# Altium schematic symbol library bms_slave-mc33771c.SCHLIB: 83 symbols (part 1 of 2)
Pins are listed as number, name and electrical type; pins without a type are passive.

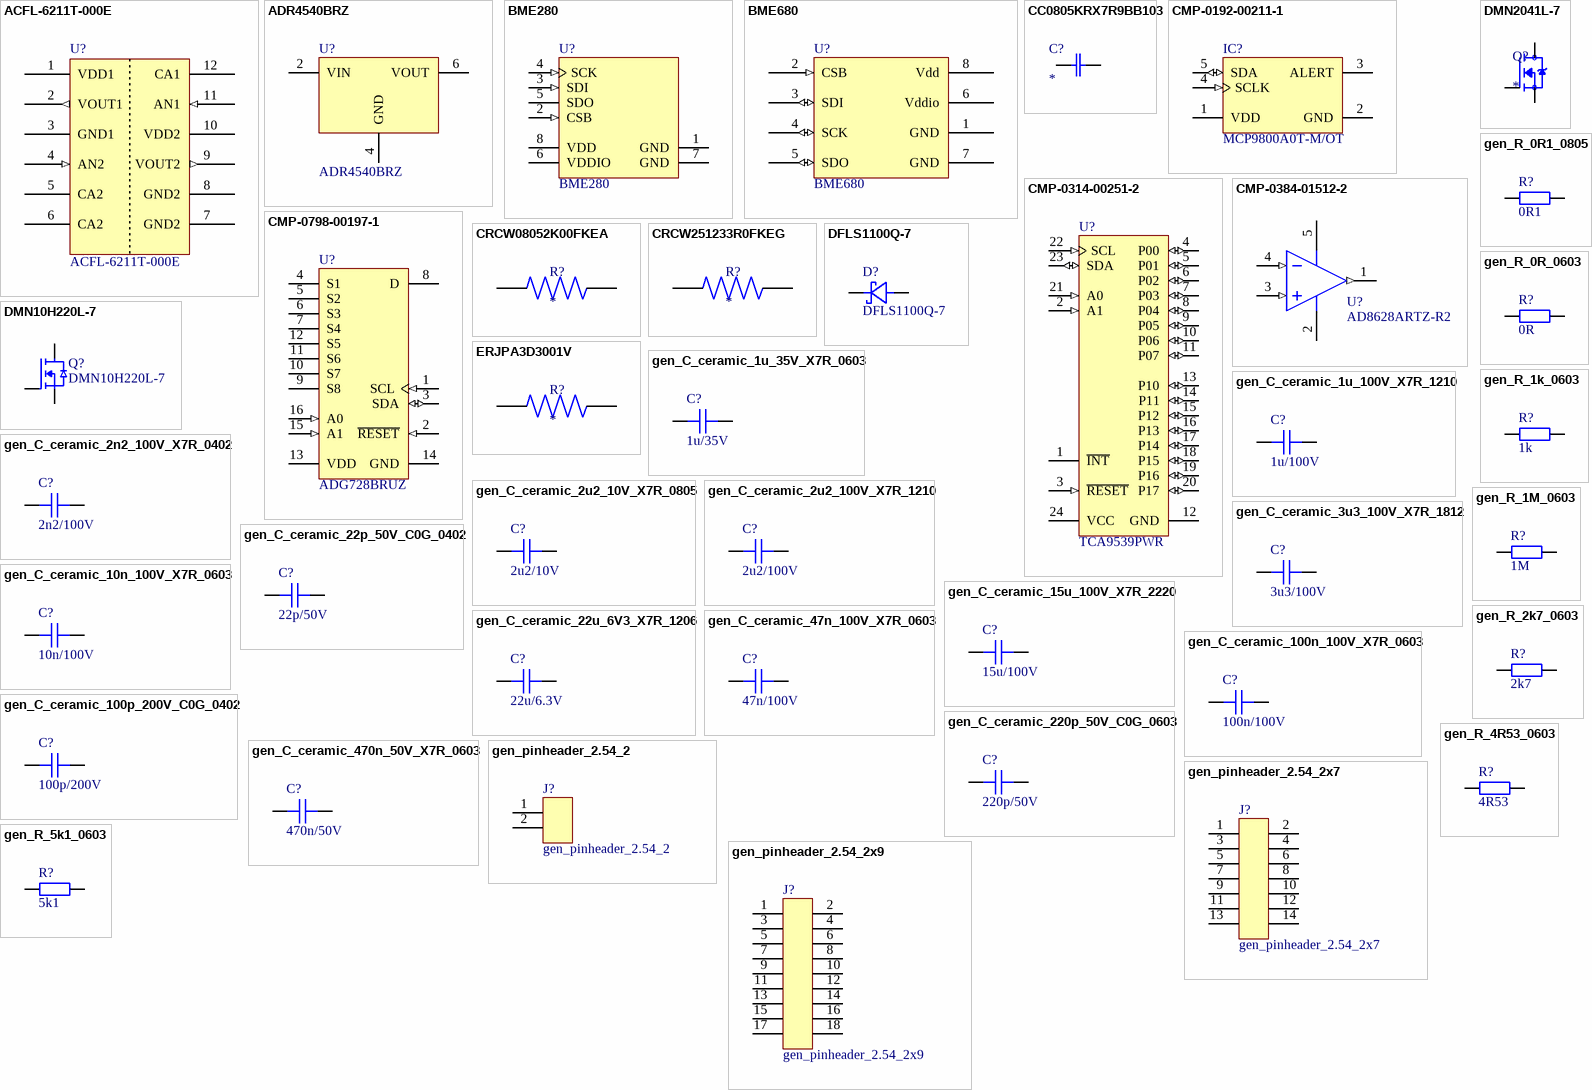
[diagram p0: symbols ACFL-6211T-000E to gen_R_5k1_0603]

## ACFL-6211T-000E
designator U?
15MBd Dual-channel Bi-directional Optocoupler; Manufacturer: Broadcom; PnP Package: 12-BSOP; Automotive Qualified: True; AEC-Q Norm: AEC-Q100; AEC-Q Grade: Grade 1; Part Number: ACFL-6211T-000E; Part Name: ACFL-6211T-000E; Operating Temperature: -40°C - +125°C; ComponentLink1Description: Datasheet; ComponentLink1URL: https://docs.broadcom.com/docs/AV02-4835EN; Supplier 1: Digikey; Supplier Part Number 1: 516-3808-ND; Supplier 2: Mouser; Supplier Part Number 2: 630-ACFL6211T000E; ECCN: EAR99
footprint Broadcom_ACFL-6211T
pins: 1 VDD1 (power), 2 VOUT1 (out), 3 GND1 (power), 4 AN2 (in), 5 CA2, 6 CA2, 7 GND2 (power), 8 GND2 (power), 9 VOUT2 (out), 10 VDD2 (power), 11 AN1 (in), 12 CA1

## ADR4540BRZ
designator U?
Ultralow Noise, High Accuracy 4.096V Reference; Manufacturer: Analog Devices; PnP Package: SO-8; Automotive Qualified: True; AEC-Q Norm: AEC-Q100; AEC-Q Grade: unknown; Part Number: ADR4540BRZ; Part Name: ADR4540BRZ; Operating Temperature: −40°C - +125°C; ComponentLink1Description: Datasheet; ComponentLink1URL: http://www.analog.com/media/en/technical-documentation/data-sheets/ADR4520_4525_4530_4533_4540_4550.pdf; Supplier 1: Farnell; Supplier Part Number 1: 2112692; Supplier 2: Mouser; Supplier Part Number 2: 584-ADR4540BRZ; Supplier 3: Digikey; Supplier Part Number 3: ADR4540BRZ-ND; ECCN: EAR99
footprint SOIC127P600X175-8N
pins: 2 VIN (power), 4 GND (power), 6 VOUT (power)

## BME280
designator U?
Low power pressure, temperature & humidity sensor; Manufacturer: Bosch Sensortec; PnP Package: LGA; Automotive Qualified: False; Datasheet Version: Rev. 1.2, 10/2015; Datasheet URL: http://datasheet.octopart.com/BME280-Bosch-datasheet-58577763.pdf; Manufacturer URL: http://www.bosch-sensortec.com; Part Number: BME280; Part Name: BME280; Operating Temperature: -40°C - +85°C; ComponentLink1Description: Datasheet; ComponentLink1URL: https://ae-bst.resource.bosch.com/media/_tech/media/datasheets/BST-BME280-DS002.pdf; Supplier 1: Digikey; Supplier Part Number 1: 828-1063-1-ND; Supplier 2: Mouser; Supplier Part Number 2: 262-BME280
footprint BOSC-BME280-8_V (SMD, 8-Leads, Body 2.5x2.5mm, Pitch 0.65mm)
pins: 1 GND (power) "Ground", 2 CSB (in) "Chip select", 3 SDI (in) "Serial data input", 4 SCK (in) "Serial clock input", 5 SDO "Serial data output", 6 VDDIO (power) "Digital/Interface supply", 7 GND (power) "Ground", 8 VDD (power) "Analog supply"

## BME680
designator U?
Low power gas, pressure, temperature & humidity sensor; Manufacturer: Bosch Sensortec; PnP Package: LGA; Automotive Qualified: False; Part Number: BME680; Part Name: BME680; Operating Temperature: -40°C - +85°C; ComponentLink1Description: Datasheet; ComponentLink1URL: https://ae-bst.resource.bosch.com/media/_tech/media/datasheets/BST-BME680-DS001.pdf; Supplier 1: Digikey; Supplier Part Number 1: 828-1077-1-ND; Supplier 2: Mouser; Supplier Part Number 2: 262-BME680
footprint BME680
pins: 1 GND (power) "Ground", 2 CSB (in) "Chip select", 3 SDI (io) "Serial data input", 4 SCK (io) "Serial clock input", 5 SDO (io) "Serial data output", 6 Vddio (power) "Digital / Interface supply", 7 GND (power) "Ground", 8 Vdd (power) "Analog supply"

## CC0805KRX7R9BB103
designator C?
10000 pF Â±10% 50V Ceramic Capacitor X7R 0805 (2012 Metric); MF: Yageo; MP: CC0805KRX7R9BB103; SnapEDA_Link: https://www.snapeda.com/parts/CC0805KRX7R9BB103/Yageo/view-part/?ref=snap; Package: 0805 Yageo; Value: *; Check_prices: https://www.snapeda.com/parts/CC0805KRX7R9BB103/Yageo/view-part/?ref=eda
footprint CAPC2013X110N
pins: 1 C1, 2 C2

## CMP-0192-00211-1
designator IC?, comment MCP9800A0T-M/OT
2-Wire High-Accuracy Temperature Sensor, Slave Address 000, 5-Pin SOT-23, -55°C to +125°C Temperature, Tape and Reel; PackageReference: SOT-23-OT5; PackageVersion: revBB, Aug-2009; DatasheetVersion: revD, Nov-2010; PackageDescription: 5-Lead Plastic Small Outline Transistor (OT) [SOT-23]; Code_IPC: SOT23-5
footprint SOT-23-OT5_L (SOT23, 5-Leads, Body 2.9x1.6mm, Pitch 0.95mm, Lead Span 2.7mm, IPC High Density)
footprint SOT-23-OT5_M (SOT23, 5-Leads, Body 2.9x1.6mm, Pitch 0.95mm, Lead Span 2.7mm, IPC Low Density)
footprint SOT-23-OT5_N (SOT23, 5-Leads, Body 2.9x1.6mm, Pitch 0.95mm, Lead Span 2.7mm, IPC Medium Density)
pins: 1 VDD (power), 2 GND (power), 3 ALERT (oc), 4 SCLK (in), 5 SDA (io)

## CMP-0314-00251-2
designator U?, comment TCA9539PWR
Remote 16-Bit I2C and SMBus, Low-Power I/O Expander with Interrupt Output, Reset & Config. Register, 1.65 to 5.5 V, -40 to 85 degC, 24-pin TSSOP (PW), Green (RoHS & no Sb/Br); Manufacturer: Texas Instruments; Interrupt Output: Yes; SubFamily: I2C IO Expander; I2C Address: 1110 1xx; # of I/Os: 16; Max Frequency(kHz): 400; 5V Tolerant I/O: Yes; ComponentLink1Description: Datasheet; PartNumber: TCA9539PWR; Eco-Plan: Green (RoHS & no Sb/Br); Reset Input: Yes; ComponentLink2Description: Package Specification; Mounting Technology: Surface Mount; PackageReference: PW0024A; DatasheetVersion: SCPS202A; ComponentLink1URL: http://www.ti.com/general/docs/lit/getliterature.tsp?genericPartNumber=TCA9539&fileType=pdf; Vcc range(V): 1.65 to 5.5; Low Power: Yes; Code_JEDEC: MO-153; Configuration Registers: Yes; PackageVersion: revG, Feb-2011; PackageDescription: 24-Pin Thin Small Outline Package 0.65 mm Pitch; Push-Pull I/O Type: Yes; ComponentLink2URL: http://www.ti.com/litv/pdf/mpds177g
footprint PW0024A_M (SOP, 24-Leads, Body 7.9x4.5mm, Pitch 0.65mm, IPC Low Density)
footprint PW0024A_L (SOP, 24-Leads, Body 7.9x4.5mm, Pitch 0.65mm, IPC High Density)
footprint PW0024A_N (SOP, 24-Leads, Body 7.9x4.5mm, Pitch 0.65mm, IPC Medium Density)
pins: 1 ~{INT} (oc) "Interrupt output. Connect to VCC through a pullup resistor.", 2 A1 (in) "Address input. Connect directly to VCC or ground.", 3 ~{RESET} (in) "Active-low reset input. Connect to VCC  through a pullup resistor, if no active connection is used.", 4 P00 (io) "P-port input/output. Push-pull design structure. At power-on, P00 is configured as an input.", 5 P01 (io) "P-port input/output. Push-pull design structure. At power-on, P01 is configured as an input.", 6 P02 (io) "P-port input/output. Push-pull design structure. At power-on, P02 is configured as an input.", 7 P03 (io) "P-port input/output. Push-pull design structure. At power-on, P03 is configured as an input.", 8 P04 (io) "P-port input/output. Push-pull design structure. At power-on, P04 is configured as an input.", 9 P05 (io) "P-port input/output. Push-pull design structure. At power-on, P05is configured as an input.", 10 P06 (io) "P-port input/output. Push-pull design structure. At power-on, P06 is configured as an input.", 11 P07 (io) "P-port input/output. Push-pull design structure. At power-on, P07 is configured as an input.", 12 GND (power) "Ground", 13 P10 (io) "P-port input/output. Push-pull design structure. At power-on, P10 is configured as an input.", 14 P11 (io) "P-port input/output. Push-pull design structure. At power-on, P11 is configured as an input.", 15 P12 (io) "P-port input/output. Push-pull design structure. At power-on, P12 is configured as an input.", 16 P13 (io) "P-port input/output. Push-pull design structure. At power-on, P13 is configured as an input.", 17 P14 (io) "P-port input/output. Push-pull design structure. At power-on, P14 is configured as an input.", 18 P15 (io) "P-port input/output. Push-pull design structure. At power-on, P15 is configured as an input.", 19 P16 (io) "P-port input/output. Push-pull design structure. At power-on, P16 is configured as an input.", 20 P17 (io) "P-port input/output. Push-pull design structure. At power-on, P17 is configured as an input.", 21 A0 (in) "Address input. Connect directly to VCC or ground.", 22 SCL (in) "Serial clock bus. Connect to VCC through a pullup resistor.", 23 SDA (io) "Serial data bus. Connect to VCC through a pullup resistor.", 24 VCC (power) "Supply voltage"

## CMP-0384-01512-2
designator U?, comment AD8628ARTZ-R2
Single Channel RRIO Operational Amplifier, 2.5 MHz BW, 1 V/us SR, Industrial, 5-pin SOT23 (RJ-5), Reel; Manufacturer: Analog Devices; Generic Part Number: AD8628; Iq/Amp: 1.1mA; Automotive Qualified: Yes; V Span Max: 6V; Input Bias Current: 30pA; Slew Rate: 1V/us; Amplifiers Per Package: 1; Input Offset Voltage: 1uV; Small Signal Bandwidth: 2.5MHz; V Span Min: 2.7V; ComponentLink1Description: Manufacturer URL; DatasheetVersion: Rev. I; ComponentLink4Description: Reference Circuit; Code_JEDEC: MO-178-AA; PackageDescription: 5-Pin Small Outline Transistor Package, Body 2.9 x 1.6 mm, Pitch 0.95 mm; ComponentLink3URL: http://www.analog.com/static/imported-files/packages/PKG_PDF/SOT-23(RJ)/RJ_5.pdf; PackageReference: RJ-5; ComponentLink1URL: http://www.analog.com/en/index.html; PackageVersion: 121608-A; RevisionNote: Reference Circuit URL fixed; Mounting Technology: Surface Mount; ComponentLink2Description: Datasheet; ComponentLink3Description: Package Specification; ComponentLink4URL: http://www.analog.com/en/all-operational-amplifiers-op-amps/operational-amplifiers-op-amps/ad8628/products/product.html#product-recommendations; ComponentLink2URL: http://www.analog.com/static/imported-files/data_sheets/AD8628_8629_8630.pdf; PartNumber: AD8628ARTZ-R2
footprint ADI-RJ-5_M (SOT-23, 5-Leads, Body 2.9x1.6mm, Pitch 0.95mm, IPC Low Density)
footprint ADI-RJ-5_N (SOT-23, 5-Leads, Body 2.9x1.6mm, Pitch 0.95mm, IPC Medium Density)
footprint ADI-RJ-5_L (SOT-23, 5-Leads, Body 2.9x1.6mm, Pitch 0.95mm, IPC High Density)
pins: 1 OUT (out), 2 -V (power), 3 +IN (in), 4 -IN (in), 5 +V (power)

## CMP-0798-00197-1
designator U?, comment ADG728BRUZ
CMOS, Low Voltage, 2-Wire Serially Controlled, Matrix Switch, -40 to 85 degC, 16-pin SOP (RU-16), Tube; Manufacturer: Analog Devices; Ron (ohms): 2.5; Supply V Guar Performance: Single_(+3V), Single_(+5V); Max Analog Signal Range: 0 to Vdd; Bandwidth (Hz): 65M; ComponentLink3Description: Package Specification; Packing: Tube; PartNumber: ADG728BRUZ; ComponentLink1URL: http://www.analog.com/en/index.html; Mounting Technology: Surface Mount; DatasheetVersion: Rev. C; ComponentLink1Description: Manufacturer URL; ComponentLink3URL: http:/www.analog.com/static/imported-files/packages/36244347913743854010197452789RU16.pdf; ComponentLink2URL: http://www.analog.com/static/imported-files/data_sheets/ADG728_729.pdf; PackageVersion: Nov-02; PackageDescription: 16-Pin Thin Shrink Small Outline Package, Body 5 x 4.4 mm, Pitch 0.65 mm; Code_JEDEC: MO-153AB; PackageReference: RU-16; ComponentLink2Description: Datasheet
footprint ADI-RU-16_M (SOP, 16-Leads, Body 5x4.4mm, Pitch 0.65mm, IPC Low Density)
footprint ADI-RU-16_L (SOP, 16-Leads, Body 5x4.4mm, Pitch 0.65mm, IPC High Density)
footprint ADI-RU-16_N (SOP, 16-Leads, Body 5x4.4mm, Pitch 0.65mm, IPC Medium Density)
pins: 1 SCL (in) "Serial Clock Line. This is used in conjunction with the SDA line to clock data into the 8-bit input shift register. Clock rates of up to 400 kbit/s can be accommodated with this 2-wire serial interface.", 2 ~{RESET} (in) "Active low control input that clears the input register and turns all switches to the OFF condition.", 3 SDA (io) "Serial Data Line. This is used in conjunction with the SCL line to clock data into the 8-bit input shift register during the write cycle and used to read back 1 byte of data during the read cycle. It is a bidirectional (See Datasheet)", 4 S1 "Source. May be an input or output.", 5 S2 "Source. May be an input or output.", 6 S3 "Source. May be an input or output.", 7 S4 "Source. May be an input or output.", 8 D "Drain. May be an input or output.", 9 S8 "Source. May be an input or output.", 10 S7 "Source. May be an input or output.", 11 S6 "Source. May be an input or output.", 12 S5 "Source. May be an input or output.", 13 VDD (power) "Power Supply Input. These parts can be operated from a supply of 2.7 V to 5.5 V.", 14 GND (power) "Ground Reference.", 15 A1 (in) "Address Input. Sets the second least significant bit of the 7-bit slave address.", 16 A0 (in) "Address Input. Sets the least significant bit of the 7-bit slave address."

## CRCW08052K00FKEA
designator R?
Resistor,Thick Film,Res 2 Kilohms,Pwr-Rtg 0.125 W,Tol 1%,SMT,0805,Tape & Reel | Vishay Dale CRCW08052K00FKEA; SnapEDA_Link: https://www.snapeda.com/parts/CRCW08052K00FKEA/Vishay+Dale/view-part/?ref=snap; Package: 2012 Vishay; Value: *; MF: Vishay Dale; MP: CRCW08052K00FKEA; Check_prices: https://www.snapeda.com/parts/CRCW08052K00FKEA/Vishay+Dale/view-part/?ref=eda
footprint RESC2012X50N
pins: 1, 2

## CRCW251233R0FKEG
designator R?
33 Ohms Â±1% 1.5W Chip Resistor 2512 (6432 Metric) Automotive AEC-Q200, Pulse Withstanding Thick Film; MF: Vishay; MP: CRCW251233R0FKEG; SnapEDA_Link: https://www.snapeda.com/parts/CRCW251233R0FKEG/Vishay/view-part/?ref=snap; Package: 6331 Vishay; Value: *; Check_prices: https://www.snapeda.com/parts/CRCW251233R0FKEG/Vishay/view-part/?ref=eda
footprint RESC6331X70N
pins: 1, 2

## DFLS1100Q-7
designator D?
Schottky Diode; Manufacturer: Diodes Inc.; Breakdown Voltage: 100V; Continuous Forward Current: 1A; PnP Package: POWERDI123; Automotive Qualified: True; Part Number: DFLS1100Q-7; Part Name: DFLS1100Q-7; Operating Temperature: −55°C - +175°C; ComponentLink1Description: Datasheet; ComponentLink1URL: https://www.diodes.com/assets/Datasheets/ds30497.pdf; Supplier 1: Mouser; Supplier Part Number 1: 621-DFLS1-100Q-7; Supplier 2: Digikey; Supplier Part Number 2: DFLS1100Q-7DICT-ND; Supplier 3: Farnell; Supplier Part Number 3: 3127293
footprint PowerDI123
pins: 1 K, 2 A

## DMN10H220L-7
designator Q?
MOSFET-Transistor, n-Kanal, 1.6 A, 100 V, 0.250 ohm; Part Name: NMOS; Manufacturer: Diodes; Maximum Drain-Source Voltage: 100V; Maximum Continous Drain Current (25°C): 1.6A; R_DS(on): 250m; Total Gate Charge: 4.1nC; Automotive Qualified: True; Part Number: DMN10H220L-7; Operating Temperature: -55°C - +150°C; ComponentLink1Description: Datasheet; ComponentLink1URL: https://www.diodes.com/assets/Datasheets/DMN10H220L.pdf; Supplier 1: Digikey; Supplier Part Number 1: DMN10H220L-7DICT-ND
footprint SOT95P237X110-3N
pins: D, G, S

## DMN2041L-7
designator Q?
MOSFET N-Channel 20V 6.4A SOT23 | Diodes Inc DMN2041L-7; MF: Diodes Inc.; SnapEDA_Link: https://www.snapeda.com/parts/DMN2041L-7/Diodes+Inc./view-part/?ref=snap; Package: SOT-23 Diodes Inc.; Value: *; MP: DMN2041L-7; Check_prices: https://www.snapeda.com/parts/DMN2041L-7/Diodes+Inc./view-part/?ref=eda
footprint SOT91P240X110-3N
pins: 1 G, 2 S, 3 D

## ERJPA3D3001V
designator R?
RES SMD 3K OHM 0.5% 1/4W 0603; MF: Panasonic; MP: ERJPA3D3001V; SnapEDA_Link: https://www.snapeda.com/parts/ERJPA3D3001V/Panasonic/view-part/?ref=snap; Package: 1608-2 Panasonic; Value: *; Check_prices: https://www.snapeda.com/parts/ERJPA3D3001V/Panasonic/view-part/?ref=eda
footprint RES_ERJPA3D3001V
pins: 1, 2

## gen_C_ceramic_1u_35V_X7R_0603
designator C?, comment 1u/35V
MLCC; Part Number: gen_C_ceramic_1u_35V_X7R_0603; Capacitance: 1u; Rated Voltage: 35V; Dielectric: X7R; Case EIA: 0603; Case Metric: 1608; Automotive Qualified: True; PnP Package: 0603C; PnP Value: 1uF/35V/X7R; PnP equipped: x; AEC-Q Norm: AEC-Q200; Supplier 1: Farnell; Supplier Part Number 1: 2906941; Operating Temperature: -55°C - +125°C; ECCN: EAR99
footprint CAPC1608X08N
footprint CAPC1608X08L
footprint CAPC1608X08M
pins: 1, 2

## gen_C_ceramic_1u_100V_X7R_1210
designator C?, comment 1u/100V
MLCC; Part Number: gen_C_ceramic_1u_100V_X7R_1210; Capacitance: 1u; Rated Voltage: 100V; Dielectric: X7R; Case EIA: 1210; Case Metric: 3225; AVT Set: x; Automotive Qualified: True; Supplier 1: Farnell; Supplier Part Number 1: 1301722
footprint CAPC3225X25N
footprint CAPC3225X25L
footprint CAPC3225X25M
pins: 1, 2

## gen_C_ceramic_2n2_100V_X7R_0402
designator C?, comment 2n2/100V
MLCC; Part Number: gen_C_ceramic_2n2_100V_X7R_0402; Capacitance: 2n2; Rated Voltage: 100V; Dielectric: X7R; Case EIA: 0402; Case Metric: 1005; Automotive Qualified: True; PnP Package: 0402C; Supplier 1: Digikey; Supplier Part Number 1: 490-4911-1-ND
footprint CAPC1005X06N
footprint CAPC1005X06L
footprint CAPC1005X06M
pins: 1, 2

## gen_C_ceramic_2u2_10V_X7R_0805
designator C?, comment 2u2/10V
MLCC; Part Number: gen_C_ceramic_2u2_10V_X7R_0805; Capacitance: 2u2; Rated Voltage: 10V; Dielectric: X7R; Case EIA: 0805; Case Metric: 2012; Automotive Qualified: True; Supplier 1: Farnell; Supplier Part Number 1: 2478259; Supplier 2: Farnell; Supplier Part Number 2: 2070513
footprint CAPC2012X14N
footprint CAPC2012X14L
footprint CAPC2012X14M
pins: 1, 2

## gen_C_ceramic_2u2_100V_X7R_1210
designator C?, comment 2u2/100V
MLCC; Part Number: gen_C_ceramic_2u2_100V_X7R_1210; Capacitance: 2u2; Rated Voltage: 100V; Dielectric: X7R; Case EIA: 1210; Case Metric: 3225; AVT Set: x; Automotive Qualified: True; Supplier 1: Farnell; Supplier Part Number 1: 2781417; Supplier 2: Farnell; Supplier Part Number 2: 2579027
footprint CAPC3225X25N
footprint CAPC3225X25L
footprint CAPC3225X25M
pins: 1, 2

## gen_C_ceramic_3u3_100V_X7R_1812
designator C?, comment 3u3/100V
MLCC; Part Number: gen_C_ceramic_3u3_100V_X7R_1812; Capacitance: 3u3; Rated Voltage: 100V; Dielectric: X7R; Case EIA: 1812; Case Metric: 4532; Automotive Qualified: True; Supplier 1: Farnell; Supplier Part Number 1: 2579025; Supplier 2: Digikey; Supplier Part Number 2: 399-13376-1-ND; Supplier 3: Mouser; Supplier Part Number 3: 80-C1812C335K1RAUTO
footprint CAPC4532X16N
footprint CAPC4532X16L
footprint CAPC4532X16M
pins: 1, 2

## gen_C_ceramic_10n_100V_X7R_0603
designator C?, comment 10n/100V
MLCC; Part Number: gen_C_ceramic_10n_100V_X7R_0603; Capacitance: 10n; Rated Voltage: 100V; Dielectric: X7R; Case EIA: 0603; Case Metric: 1608; PnP Package: 0603C; PnP Value: 10nF/100V/X7R; Automotive Qualified: True; AEC-Q Norm: AEC-Q200; Supplier 1: Farnell; Supplier Part Number 1: 1301715; Supplier 2: Farnell; Supplier Part Number 2: 2821192; Supplier 3: Farnell; Supplier Part Number 3: 2210878; ECCN: EAR99
footprint CAPC1608X08N
footprint CAPC1608X08L
footprint CAPC1608X08M
pins: 1, 2

## gen_C_ceramic_15u_100V_X7R_2220
designator C?, comment 15u/100V
Stacked MLCC; Part Number: gen_C_ceramic_15u_100V_X7R_2220; Capacitance: 15u; Rated Voltage: 100V; Dielectric: X7R; Case EIA: 2220; Case Metric: 5750; Automotive Qualified: True; Supplier 1: Farnell; Supplier Part Number 1: 2781468; Supplier 2: Digikey; Supplier Part Number 2: 490-5838-1-ND; Supplier 3: Mouser; Supplier Part Number 3: 81-KCM55WR72A156MH1K
footprint CAPC6153X67N
footprint CAPC6153X67L
footprint CAPC6153X67M
pins: 1, 2

## gen_C_ceramic_22p_50V_C0G_0402
designator C?, comment 22p/50V
MLCC; Part Number: gen_C_ceramic_22p_50V_C0G_0402; Capacitance: 22p; Rated Voltage: 50V; Dielectric: C0G; Case EIA: 0402; Case Metric: 1005; PnP Package: 0402C; Automotive Qualified: True; Tolerance: 1%; Supplier 1: Farnell; Supplier Part Number 1: 1856067
footprint CAPC1005X06N
footprint CAPC1005X06L
footprint CAPC1005X06M
pins: 1, 2

## gen_C_ceramic_22u_6V3_X7R_1206
designator C?, comment 22u/6.3V
MLCC; Part Number: gen_C_ceramic_22u_6V3_X7R_1206; Capacitance: 22u; Rated Voltage: 6.3V; Dielectric: X7R; Case EIA: 1206; Case Metric: 3216; Automotive Qualified: True; Supplier 1: Farnell; Supplier Part Number 1: 2672216; Supplier 2: Farnell; Supplier Part Number 2: 2211066
footprint CAPC3216X18N
footprint CAPC3216X18L
footprint CAPC3216X18M
pins: 1, 2

## gen_C_ceramic_47n_100V_X7R_0603
designator C?, comment 47n/100V
MLCC; Part Number: gen_C_ceramic_47n_100V_X7R_0603; Capacitance: 47n; Rated Voltage: 100V; Dielectric: X7R; Case EIA: 0603; Case Metric: 1608; Automotive Qualified: True; PnP Package: 0603C; Supplier 1: Farnell; Supplier Part Number 1: 2478249; Supplier 2: Farnell; Supplier Part Number 2: 2708699; Supplier 3: Farnell; Supplier Part Number 3: 2905110
footprint CAPC1608X08N
footprint CAPC1608X08L
footprint CAPC1608X08M
pins: 1, 2

## gen_C_ceramic_100n_100V_X7R_0603
designator C?, comment 100n/100V
MLCC; Part Number: gen_C_ceramic_100n_100V_X7R_0603; Capacitance: 100n; Rated Voltage: 100V; Dielectric: X7R; Case EIA: 0603; Case Metric: 1608; Automotive Qualified: True; PnP Package: 0603C; Supplier 1: Digikey; Supplier Part Number 1: 490-13420-1-ND; Supplier 2: Mouser; Supplier Part Number 2: 81-GCJ188R72A104KA1D
footprint CAPC1608X08N
footprint CAPC1608X08L
footprint CAPC1608X08M
pins: 1, 2

## gen_C_ceramic_100p_200V_C0G_0402
designator C?, comment 100p/200V
MLCC; Part Number: gen_C_ceramic_100p_200V_C0G_0402; Capacitance: 100p; Rated Voltage: 200V; Dielectric: C0G; Tolerance: 5%; Case EIA: 0402; Case Metric: 1005; PnP Package: 0402C; Automotive Qualified: True; Supplier 1: Farnell; Supplier Part Number 1: 2426878; Supplier 2: Digikey; Supplier Part Number 2: 399-11551-1-ND; Supplier 3: RS Components; Supplier Part Number 3: 8353949
footprint CAPC1005X06N
footprint CAPC1005X06L
footprint CAPC1005X06M
pins: 1, 2

## gen_C_ceramic_220p_50V_C0G_0603
designator C?, comment 220p/50V
MLCC; Part Number: gen_C_ceramic_220p_50V_C0G_0603; Capacitance: 220p; Rated Voltage: 50V; Dielectric: C0G; Case EIA: 0603; Case Metric: 1608; Automotive Qualified: True; AEC-Q Norm: AEC-Q200; PnP Package: 0603C; Supplier 1: Mouser; Supplier Part Number 1: 603-AC603JRNPO9BN221; ECCN: EAR99
footprint CAPC1608X08N
footprint CAPC1608X08L
footprint CAPC1608X08M
pins: 1, 2

## gen_C_ceramic_470n_50V_X7R_0603
designator C?, comment 470n/50V
MLCC; Part Number: gen_C_ceramic_470n_50V_X7R_0603; Capacitance: 470n; Rated Voltage: 50V; Dielectric: X7R; Case EIA: 0603; Case Metric: 1608; Automotive Qualified: True; AEC-Q Norm: AEC-Q200; PnP Package: 0603C; Supplier 1: Farnell; Supplier Part Number 1: 2547051; ECCN: EAR99
footprint CAPC1608X08N
footprint CAPC1608X08L
footprint CAPC1608X08M
pins: 1, 2

## gen_pinheader_2.54_2
designator J?
Standard Pinheader, THD, gerade, 2.54mm; Circuits: 2; Rated Voltage: 250V; Rated Current: 3A; Automotive Qualified: False; Part Number: gen_pinheader_2.54_2; Part Name: PinHeader; Operating Temperature: −40 °C - +105 °C; Supplier 1: Farnell; Supplier Part Number 1: 2505044
footprint Pinheader_2.54_2
pins: 1, 2

## gen_pinheader_2.54_2x7
designator J?
Standard Pinheader, THD, gerade, 2.54mm, 2-reihig; Circuits: 14; Rated Voltage: 250V; Rated Current: 3A; Automotive Qualified: False; Part Number: gen_pinheader_2.54_2x7; Part Name: PinHeader; Operating Temperature: −40 °C - +105 °C; Supplier 1: Mouser; Supplier Part Number 1: 200-TSW10707GD
footprint Pinheader_2.54_2x7
pins: 1, 2, 3, 4, 5, 6, 7, 8, 9, 10, 11, 12, 13, 14

## gen_pinheader_2.54_2x9
designator J?
Standard Pinheader, THD, gerade, 2.54mm, 2-reihig; Circuits: 18; Rated Voltage: 250V; Rated Current: 3A; Automotive Qualified: False; Part Number: gen_pinheader_2.54_2x9; Part Name: PinHeader; Operating Temperature: −40 °C - +105 °C; Supplier 1: Farnell; Supplier Part Number 1: 2025256
footprint Pinheader_2.54_2x9
pins: 1, 2, 3, 4, 5, 6, 7, 8, 9, 10, 11, 12, 13, 14, 15, 16, 17, 18

## gen_R_0R1_0805
designator R?, comment 0R1
SMD Resistor 0R1 0805; Part Number: gen_R_0R1_0805; Power: 250mW; Case EIA: 0805; Maximum Working Voltage: 150V; Automotive Qualified: True; Operating Temperature: -55°C - +155°C; Resistance: 0R1; Supplier 1: Farnell; Supplier Part Number 1: 2824733; Supplier 2: Digikey; Supplier Part Number 2: CRM0805AJX-R100ELFCT-ND
footprint RESC2012X05N
footprint RESC2012X05L
footprint RESC2012X05M
pins: 1, 2
1 alternate drawing of the same symbol

## gen_R_0R_0603
designator R?, comment 0R
SMD Resistor 0R 0603; Part Number: gen_R_0R_0603; Power: 0.1W; Case EIA: 0603; Case Metric: 1608; Maximum Working Voltage: 75V; PnP Package: 0603R; Automotive Qualified: True; PnP equipped: x; Operating Temperature: -55°C - +155°C; Resistance: 0R; Series: Jumper; PnP Value: 0R; Supplier 1: Farnell; Supplier Part Number 1: 2616580
footprint RESC1608X05N
footprint RESC1608X05L
footprint RESC1608X05M
pins: 1, 2
1 alternate drawing of the same symbol

## gen_R_1k_0603
designator R?, comment 1k
SMD Resistor 1k 0603; Part Number: gen_R_1k_0603; Tolerance: 1%; Power: 0.1W; Case EIA: 0603; Case Metric: 1608; Maximum Working Voltage: 75V; PnP Package: 0603R; Automotive Qualified: True; PnP equipped: x; Operating Temperature: -55°C - +155°C; Resistance: 1k; Series: E24, E96; PnP Value: 1k; Supplier 1: Farnell; Supplier Part Number 1: 1652848
footprint RESC1608X05N
footprint RESC1608X05L
footprint RESC1608X05M
pins: 1, 2
1 alternate drawing of the same symbol

## gen_R_1M_0603
designator R?, comment 1M
SMD Resistor 1M 0603; Part Number: gen_R_1M_0603; Tolerance: 1%; Power: 0.1W; Case EIA: 0603; Case Metric: 1608; Maximum Working Voltage: 75V; PnP Package: 0603R; Automotive Qualified: True; Operating Temperature: -55°C - +155°C; Resistance: 1M; Series: E24, E96; PnP Value: 1M; Supplier 1: Farnell; Supplier Part Number 1: 1469746
footprint RESC1608X05N
footprint RESC1608X05L
footprint RESC1608X05M
pins: 1, 2
1 alternate drawing of the same symbol

## gen_R_2k7_0603
designator R?, comment 2k7
SMD Resistor 2k7 0603; Part Number: gen_R_2k7_0603; Tolerance: 1%; Power: 0.1W; Case EIA: 0603; Case Metric: 1608; Maximum Working Voltage: 75V; PnP Package: 0603R; Automotive Qualified: False; Operating Temperature: -55°C - +155°C; Resistance: 2k7; Series: E24; PnP Value: 2k7
footprint RESC1608X05N
footprint RESC1608X05L
footprint RESC1608X05M
pins: 1, 2
1 alternate drawing of the same symbol

## gen_R_4R53_0603
designator R?, comment 4R53
SMD Resistor 4R53 0603; Part Number: gen_R_4R53_0603; Tolerance: 1%; Power: 0.1W; Case EIA: 0603; Case Metric: 1608; Maximum Working Voltage: 75V; PnP Package: 0603R; Automotive Qualified: False; Operating Temperature: -55°C - +155°C; Resistance: 4R53; Series: E96; PnP Value: 4R53
footprint RESC1608X05N
footprint RESC1608X05L
footprint RESC1608X05M
pins: 1, 2
1 alternate drawing of the same symbol

## gen_R_5k1_0603
designator R?, comment 5k1
SMD Resistor 5k1 0603; Part Number: gen_R_5k1_0603; Tolerance: 5%; Power: 0.1W; Case EIA: 0603; Case Metric: 1608; Maximum Working Voltage: 75V; PnP Package: 0603R; Automotive Qualified: True; AEC-Q Norm: AEC-Q200; Operating Temperature: -55°C - +155°C; Resistance: 5k1; Series: E24; PnP Value: 5k1; Supplier 1: Mouser; Supplier Part Number 1: 667-ERJ-3GEYJ512V; ECCN: EAR99
footprint RESC1608X05N
footprint RESC1608X05L
footprint RESC1608X05M
pins: 1, 2
1 alternate drawing of the same symbol

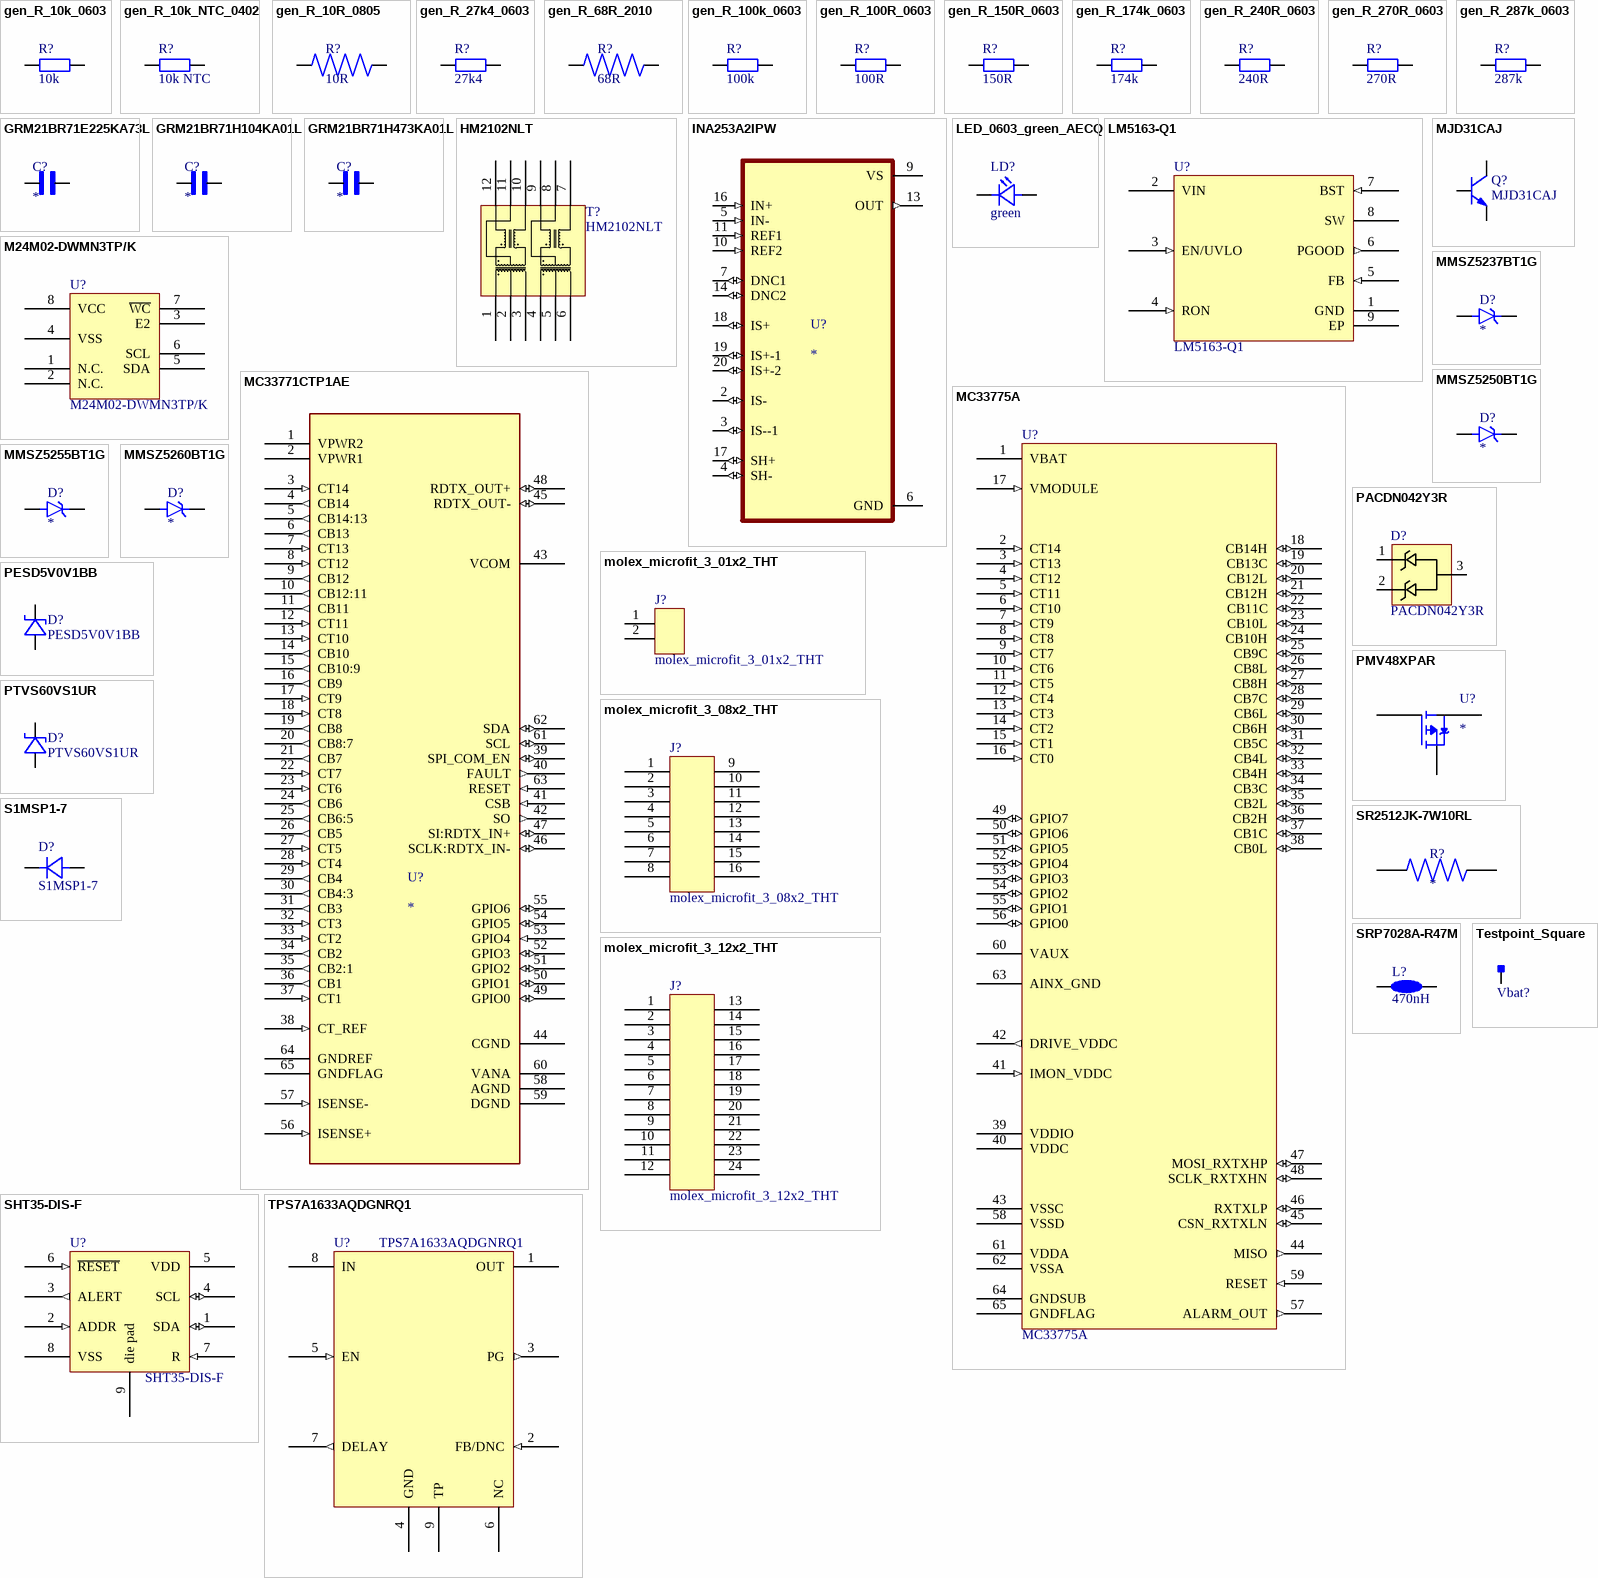
[diagram p1: symbols gen_R_10k_0603 to TPS7A1633AQDGNRQ1]

## gen_R_10k_0603
designator R?, comment 10k
SMD Resistor 10k 0603; Part Number: gen_R_10k_0603; Tolerance: 1%; Power: 0.1W; Case EIA: 0603; Case Metric: 1608; Maximum Working Voltage: 75V; PnP Package: 0603R; Automotive Qualified: True; Operating Temperature: -55°C - +155°C; Resistance: 10k; Series: E24, E96; PnP Value: 10k; Supplier 1: Farnell; Supplier Part Number 1: 2073349
footprint RESC1608X05N
footprint RESC1608X05L
footprint RESC1608X05M
pins: 1, 2
1 alternate drawing of the same symbol

## gen_R_10k_NTC_0402
designator R?, comment 10k NTC
SMD Resistor 10k NTC 0402; Part Number: gen_R_10k_NTC_0402; Power: 0.150W; Case EIA: 0402; Maximum Working Voltage: 50V; Automotive Qualified: True; Operating Temperature: -40°C - +150°C; Resistance: 10k NTC; Tolerance: *; Series: NTC; Supplier 1: Farnell; Supplier Part Number 1: 2432559; Supplier 2: Digikey; Supplier Part Number 2: 495-76289-1-ND
footprint RESC1005X04N
footprint RESC1005X04L
footprint RESC1005X04M
pins: 1, 2
1 alternate drawing of the same symbol

## gen_R_10R_0805
designator R?, comment 10R
SMD Resistor 10R 0805; Part Number: gen_R_10R_0805; Tolerance: 1%; Power: 0.125W; Case EIA: 0805; Case Metric: 2012; Maximum Working Voltage: 150V; PnP Package: 0805R; Automotive Qualified: True; AEC-Q Norm: AEC-Q200; AEC-Q Grade: Grade 0; Operating Temperature: -55°C - +155°C; Resistance: 10R; Series: E24, E96; PnP Value: 10R; Supplier 1: Farnell; Supplier Part Number 1: 1750728; ECCN: EAR99
footprint RESC2012X05N
footprint RESC2012X05L
footprint RESC2012X05M
pins: 1, 2
1 alternate drawing of the same symbol

## gen_R_27k4_0603
designator R?, comment 27k4
SMD Resistor 27k4 0603; Part Number: gen_R_27k4_0603; Tolerance: 1%; Power: 0.1W; Case EIA: 0603; Case Metric: 1608; Maximum Working Voltage: 75V; PnP Package: 0603R; Automotive Qualified: True; AEC-Q Norm: AEC-Q 200; Operating Temperature: -55°C - +155°C; Resistance: 27k4; Series: E96; PnP Value: 27k4; Supplier 1: Mouser; Supplier Part Number 1: 667-ERJ-3EKF2742V; ECCN: EAR99
footprint RESC1608X05N
footprint RESC1608X05L
footprint RESC1608X05M
pins: 1, 2
1 alternate drawing of the same symbol

## gen_R_68R_2010
designator R?, comment 68R
SMD Resistor 68R 2010; Part Number: gen_R_68R_2010; Tolerance: 1%; Power: 0.75W; Case EIA: 2010; Case Metric: 5025; Maximum Working Voltage: 200V; PnP Package: 2010R; Automotive Qualified: True; Operating Temperature: -55°C - +155°C; Resistance: 68R; Series: E24; PnP Value: 68R; Supplier 1: Farnell; Supplier Part Number 1: 2323988
footprint RESC5025X07N
footprint RESC5025X07L
footprint RESC5025X07M
pins: 1, 2
1 alternate drawing of the same symbol

## gen_R_100k_0603
designator R?, comment 100k
SMD Resistor 100k 0603; Part Number: gen_R_100k_0603; Tolerance: 1%; Power: 0.1W; Case EIA: 0603; Case Metric: 1608; Maximum Working Voltage: 75V; PnP Package: 0603R; Automotive Qualified: True; PnP equipped: x; Operating Temperature: -55°C - +155°C; Resistance: 100k; Series: E24, E96; PnP Value: 100k; Supplier 1: Farnell; Supplier Part Number 1: 2303232
footprint RESC1608X05N
footprint RESC1608X05L
footprint RESC1608X05M
pins: 1, 2
1 alternate drawing of the same symbol

## gen_R_100R_0603
designator R?, comment 100R
SMD Resistor 100R 0603; Part Number: gen_R_100R_0603; Tolerance: 1%; Power: 0.1W; Case EIA: 0603; Case Metric: 1608; Maximum Working Voltage: 75V; PnP Package: 0603R; Automotive Qualified: True; PnP equipped: x; Operating Temperature: -55°C - +155°C; Resistance: 100R; Series: E24, E96; PnP Value: 100R; Supplier 1: Digikey; Supplier Part Number 1: P100HCT-ND
footprint RESC1608X05N
footprint RESC1608X05L
footprint RESC1608X05M
pins: 1, 2
1 alternate drawing of the same symbol

## gen_R_150R_0603
designator R?, comment 150R
SMD Resistor 150R 0603; Part Number: gen_R_150R_0603; Tolerance: 1%; Power: 0.1W; Case EIA: 0603; Case Metric: 1608; Maximum Working Voltage: 75V; PnP Package: 0603R; Automotive Qualified: True; AEC-Q Grade: Grade 0; AEC-Q Norm: AEC-Q200; Operating Temperature: -55°C - +155°C; Resistance: 150R; Series: E24, E96; PnP Value: 150R; ECCN: EAR99; Supplier 1: Farnell; Supplier Part Number 1: 2303076
footprint RESC1608X05N
footprint RESC1608X05L
footprint RESC1608X05M
pins: 1, 2
1 alternate drawing of the same symbol

## gen_R_174k_0603
designator R?, comment 174k
SMD Resistor 174k 0603; Part Number: gen_R_174k_0603; Tolerance: 1%; Power: 0.1W; Case EIA: 0603; Case Metric: 1608; Maximum Working Voltage: 75V; PnP Package: 0603R; Automotive Qualified: True; AEC-Q Norm: AEC-Q200; Operating Temperature: -55°C - +155°C; Resistance: 174k; Series: E96; PnP Value: 174k; Supplier 1: Mouser; Supplier Part Number 1: 667-ERJ-3EKF1743V; ECCN: EAR99
footprint RESC1608X05N
footprint RESC1608X05L
footprint RESC1608X05M
pins: 1, 2
1 alternate drawing of the same symbol

## gen_R_240R_0603
designator R?, comment 240R
SMD Resistor 240R 0603; Part Number: gen_R_240R_0603; Tolerance: 1%; Power: 0.1W; Case EIA: 0603; Case Metric: 1608; Maximum Working Voltage: 75V; PnP Package: 0603R; Automotive Qualified: True; AEC-Q Norm: AEC-Q200; Operating Temperature: -55°C - +155°C; Resistance: 240R; Series: E24; PnP Value: 240R; Supplier 1: Mouser; Supplier Part Number 1: 667-ERJ-3EKF2400V; ECCN: EAR99
footprint RESC1608X05N
footprint RESC1608X05L
footprint RESC1608X05M
pins: 1, 2
1 alternate drawing of the same symbol

## gen_R_270R_0603
designator R?, comment 270R
SMD Resistor 270R 0603; Part Number: gen_R_270R_0603; Tolerance: 1%; Power: 0.1W; Case EIA: 0603; Case Metric: 1608; Maximum Working Voltage: 75V; PnP Package: 0603R; Automotive Qualified: True; Operating Temperature: -55°C - +155°C; Resistance: 270R; Series: E24; PnP Value: 270R; Supplier 1: Farnell; Supplier Part Number 1: 2141320
footprint RESC1608X05N
footprint RESC1608X05L
footprint RESC1608X05M
pins: 1, 2
1 alternate drawing of the same symbol

## gen_R_287k_0603
designator R?, comment 287k
SMD Resistor 287k 0603; Part Number: gen_R_287k_0603; Tolerance: 1%; Power: 0.1W; Case EIA: 0603; Case Metric: 1608; Maximum Working Voltage: 75V; PnP Package: 0603R; Automotive Qualified: True; AEC-Q Norm: AEC-Q200; Operating Temperature: -55°C - +155°C; Resistance: 287k; Series: E96; PnP Value: 287k; Supplier 1: Mouser; Supplier Part Number 1: 667-ERJ-3EKF2873V; ECCN: EAR99
footprint RESC1608X05N
footprint RESC1608X05L
footprint RESC1608X05M
pins: 1, 2
1 alternate drawing of the same symbol

## GRM21BR71E225KA73L
designator C?
SMD Capacitor X7R(EIA) with Capacitance: 2.2uF Tol. 10%. Rated Voltage: 25Vdc; MF: Murata; MP: GRM21BR71E225KA73L; SnapEDA_Link: https://www.snapeda.com/parts/GRM21BR71E225KA73L/Murata/view-part/?ref=snap; Package: 2012 Murata; Value: *; Check_prices: https://www.snapeda.com/parts/GRM21BR71E225KA73L/Murata/view-part/?ref=eda
footprint CAPC2012X135N
pins: 1, 2

## GRM21BR71H104KA01L
designator C?
Seramik, X7R, 50V, 0805 Kılıf0.1 µF / 100 nF; MF: Murata; MP: GRM21BR71H104KA01L; SnapEDA_Link: https://www.snapeda.com/parts/GRM21BR71H104KA01L/Murata/view-part/?ref=snap; Package: 805-2 Murata; Value: *; Check_prices: https://www.snapeda.com/parts/GRM21BR71H104KA01L/Murata/view-part/?ref=eda
footprint CAPC2012X135N
pins: 1, 2

## GRM21BR71H473KA01L
designator C?
SMD Capacitor X7R(EIA) with Capacitance: 47000pF Tol. 10%. Rated Voltage: 50Vdc; MF: Murata; MP: GRM21BR71H473KA01L; SnapEDA_Link: https://www.snapeda.com/parts/GRM21BR71H473KA01L/Murata/view-part/?ref=snap; Package: 805-2 Murata; Value: *; Check_prices: https://www.snapeda.com/parts/GRM21BR71H473KA01L/Murata/view-part/?ref=eda
footprint CAPC2012X135N
pins: 1, 2

## HM2102NLT
designator T?
Pulse HM2102NLT BMS Transformer; Automotive Qualified: True; AEC-Q Norm: AEC-Q200; Part Number: HM2102NLT; Manufacturer: Pulse; Operating Temperature: -40°C - +125°C; ComponentLink1Description: Datasheet; ComponentLink1URL: https://www.mouser.de/datasheet/2/336/HM2102NL-1218600.pdf; ECCN: EAR99; Supplier 1: Mouser; Supplier Part Number 1: 673-HM2102NLT; Supplier 2: Digikey; Supplier Part Number 2: 1840-1034-1-ND
footprint HM2102NL
pins: 1, 2, 3, 4, 5, 6, 7, 8, 9, 10, 11, 12

## INA253A2IPW
designator U?
MP: INA253A2IPW; Package: None; Price: None; Value: *; Availability: Unavailable
footprint SOP65P640X120-20N
pins: 2 IS- (io), 3 IS--1 (io), 4 SH- (io), 5 IN- (in), 6 GND (power), 7 DNC1 (io), 9 VS (power), 10 REF2 (in), 11 REF1 (in), 13 OUT (out), 14 DNC2 (io), 16 IN+ (in), 17 SH+ (io), 18 IS+ (io), 19 IS+-1 (io), 20 IS+-2 (io)

## LED_0603_green_AECQ
designator LD?, comment green
TLMG1100-GS08; Part Number: LED_0603_green_AECQ; Manufacturer: Vishay; Breakdown Voltage: 5V; Continuous Forward Current: 20mA; Forward Voltage @ 20mA: 2.1V; PnP Package: LED_0603; Automotive Qualified: True; Color: green; Supplier 1: Farnell; Supplier Part Number 1: 2293494; Operating Temperature: -40°C - 100°C; ComponentLink1Description: Datasheet; ComponentLink1URL: http://www.farnell.com/datasheets/2049164.pdf; Supplier 2: Digikey; Supplier Part Number 2: 751-1165-1-ND
footprint LEDC1608X07N
footprint LEDC1608X07L
footprint LEDC1608X07M
pins: 1 C, 2 A

## LM5163-Q1
designator U?
100-V Input, 0.5-A SynchronousBuck DC/DCConverterwith Ultra-lowIQ; Manufacturer: Texas Instruments; Automotive Qualified: True; Part Number: LM5163-Q1; Part Name: LM5163-Q1; Operating Temperature: -40°C - +125°C; ComponentLink1Description: Datasheet; ComponentLink1URL: http://www.ti.com/lit/ds/symlink/lm5163-q1.pdf; Supplier 1: Digikey; Supplier Part Number 1: 296-53561-1-ND; Supplier 2: Mouser; Supplier Part Number 2: 595-LM5163QDDARQ1
footprint R-PDSO-G8
pins: 1 GND (power), 2 VIN (power), 3 EN/UVLO (in), 4 RON (in), 5 FB (in), 6 PGOOD (out), 7 BST (in), 8 SW (power), 9 EP (power)

## M24M02-DWMN3TP/K
designator U?
Automotive 2-Mbit serial I²C / bus EEPROM with 1 MHz clock; Manufacturer: STMicroelectronics; PnP Package: SO8N; Automotive Qualified: True; Part Number: M24M02-DWMN3TP/K; Part Name: M24M02-DWMN3TP/K; Operating Temperature: -40°C - +125°C; ComponentLink1Description: Datasheet; ComponentLink1URL: http://www.st.com/content/ccc/resource/technical/document/datasheet/83/f4/3e/e4/4e/49/42/c5/DM00200595.pdf/files/DM00200595.pdf/jcr:content/translations/en.DM00200595.pdf; Supplier 1: Digikey; Supplier Part Number 1: 497-16238-1-ND; Supplier 2: Mouser; Supplier Part Number 2: 511-M24M02-DWMN3TP/K; Supplier 3: Farnell; Supplier Part Number 3: 2849971
footprint SOIC127P600X175-8N
footprint SOIC127P600X175-8L
footprint SOIC127P600X175-8M
pins: 1 N.C., 2 N.C., 3 E2, 4 VSS (power), 5 SDA, 6 SCL, 7 ~{WC}, 8 VCC (power)

## MC33771CTP1AE
designator U?
Battery Battery Cell Controller IC Lithium Ion 64-LQFP (10x10); MF: NXP Semiconductors; MP: MC33771CTP1AE; SnapEDA_Link: https://www.snapeda.com/parts/MC33771CTP1AE/NXP+Semiconductors/view-part/?ref=snap; Package: None; Value: *; Check_prices: https://www.snapeda.com/parts/MC33771CTP1AE/NXP+Semiconductors/view-part/?ref=eda
footprint QFP50P1200X1200X160-65N
pins: 1 VPWR2 (oe), 2 VPWR1 (power), 3 CT14 (in), 4 CB14 (out), 5 CB14:13 (out), 6 CB13 (out), 7 CT13 (in), 8 CT12 (in), 9 CB12 (out), 10 CB12:11 (out), 11 CB11 (out), 12 CT11 (in), 13 CT10 (in), 14 CB10 (out), 15 CB10:9 (out), 16 CB9 (out), 17 CT9 (in), 18 CT8 (in), 19 CB8 (out), 20 CB8:7 (out), 21 CB7 (out), 22 CT7 (in), 23 CT6 (in), 24 CB6 (out), 25 CB6:5 (out), 26 CB5 (out), 27 CT5 (in), 28 CT4 (in), 29 CB4 (out), 30 CB4:3 (out), 31 CB3 (out), 32 CT3 (in), 33 CT2 (in), 34 CB2 (out), 35 CB2:1 (out), 36 CB1 (out), 37 CT1 (in), 38 CT_REF (in), 39 SPI_COM_EN (io), 40 FAULT (out), 41 CSB (in), 42 SO (out), 43 VCOM (power), 44 CGND (power), 45 RDTX_OUT- (io), 46 SCLK:RDTX_IN- (io), 47 SI:RDTX_IN+ (io), 48 RDTX_OUT+ (io), 49 GPIO0 (io), 50 GPIO1 (io), 51 GPIO2 (io), 52 GPIO3 (io), 53 GPIO4 (in), 54 GPIO5 (io), 55 GPIO6 (io), 56 ISENSE+ (in), 57 ISENSE- (in), 58 AGND (power), 59 DGND (power), 60 VANA (power), 61 SCL (io), 62 SDA (io), 63 RESET (in), 64 GNDREF  (power), 65 GNDFLAG (power)

## MC33775A
designator U?
14 Cells Battery Cell Controller IC; Manufacturer: NXP; Automotive Qualified: True; AEC-Q Norm: AEC-Q100; AEC-Q Grade: Grade 1; Part Number: MC33775A; Part Name: MC33775A; Operating Temperature: −40°C - +125°C
footprint NXP_SOT1510-2
pins: 1 VBAT (power) "Power input of the product.", 2 CT14 (in) "Cell terminal 14 input.", 3 CT13 (in) "Cell terminal 13 input.", 4 CT12 (in) "Cell terminal 12 input.", 5 CT11 (in) "Cell terminal 11 input.", 6 CT10 (in) "Cell terminal 10 input.", 7 CT9 (in) "Cell terminal 9 input.", 8 CT8 (in) "Cell terminal 8 input.", 9 CT7 (in) "Cell terminal 7 input.", 10 CT6 (in) "Cell terminal 6 input.", 11 CT5 (in) "Cell terminal 5 input.", 12 CT4 (in) "Cell terminal 4 input.", 13 CT3 (in) "Cell terminal 3 input.", 14 CT2 (in) "Cell terminal 2 input.", 15 CT1 (in) "Cell terminal 1 input.", 16 CT0 (in) "Cell terminal 0 input.", 17 VMODULE (in) "Module voltage measurement input.", 18 CB14H (io) "Cell 13 balancing switch terminal (1);", 19 CB13C (io) "Cell 13 and Cell 12 common balancing switch terminal (1);", 20 CB12L (io) "Cell 12 balancing switch terminal (1);", 21 CB12H (io) "Cell 11 balancing switch terminal (1);", 22 CB11C (io) "Cell 11 and Cell 10 common balancing switch terminal (1);", 23 CB10L (io) "Cell 10 balancing switch terminal (1);", 24 CB10H (io) "Cell 9 balancing switch terminal (1);", 25 CB9C (io) "Cell 9 and Cell 8 common balancing switch terminal (1);", 26 CB8L (io) "Cell 8 balancing switch terminal (1);", 27 CB8H (io) "Cell 7 balancing switch terminal (1);", 28 CB7C (io) "Cell 7 and Cell 6 common balancing switch terminal (1);", 29 CB6L (io) "Cell 6 balancing switch terminal (1);", 30 CB6H (io) "Cell 5 balancing switch terminal (1);", 31 CB5C (io) "Cell 5 and Cell 4 common balancing switch terminal (1);", 32 CB4L (io) "Cell 4 balancing switch terminal (1);", 33 CB4H (io) "Cell 3 balancing switch terminal (1);", 34 CB3C (io) "Cell 3 and Cell 2 common balancing switch terminal (1);", 35 CB2L (io) "Cell 2 balancing switch terminal (1);", 36 CB2H (io) "Cell 1 balancing switch terminal (1);", 37 CB1C (io) "Cell 1 and Cell 0 common balancing switch terminal (1);", 38 CB0L (io) "Cell 0 balancing switch terminal (1);", 39 VDDIO (power) "External VDDIO supply input.", 40 VDDC (power) "External VDDC supply input.", 41 IMON_VDDC (in) "External NPN monitoring input.", 42 DRIVE_VDDC (out) "External NPN base output.", 43 VSSC (power) "VDDIO and VDDC ground reference.", 44 MISO (out) "SPI slave data output to master.", 45 CSN_RXTXLN (io) "SPI chip select input from master (1);", 46 RXTXLP (io) "TPL RX positive input from lower node (1);", 47 MOSI_RXTXHP (io) "SPI slave data input from master (1);", 48 SCLK_RXTXHN (io) "SPI clock input from master (1);", 49 GPIO7 (io) "Analog input AIN7 for ratiometric measurement to VAUX / VDDC", 50 GPIO6 (io) "Analog input AIN6 for ratiometric measurement to VAUX / VDDC", 51 GPIO5 (io) "Analog input AIN5 for ratiometric measurement to VAUX / VDDC", 52 GPIO4 (io) "Analog input AIN4 for ratiometric measurement to VAUX / VDDC", 53 GPIO3 (io) "Analog input AIN3 for ratiometric measurement to VAUX / VDDC", 54 GPIO2 (io) "Analog input AIN2 for ratiometric measurement to VAUX / VDDC", 55 GPIO1 (io) "Analog input AIN1 for ratiometric measurement to VAUX / VDDC", 56 GPIO0 (io) "Analog input AIN0 for ratiometric measurement to VAUX / VDDC", 57 ALARM_OUT (out) "ALARM output.", 58 VSSD (power) "Digital ground.", 59 RESET (in) "Reset input.", 60 VAUX (power) "Supply output for external auxiliary temperature sensors.", 61 VDDA (power) "Supply output for internal analog functions.", 62 VSSA (power) "Analog ground.", 63 AINX_GND (power) "AINX inputs reference ground.", 64 GNDSUB (power) "Ground reference for product substrate.", 65 GNDFLAG (power) "Grounded exposed pad."

## MJD31CAJ
designator Q?
100V, 3A NPN high power bipolar transistor; Manufacturer: Nexperia; Automotive Qualified: True; AEC-Q Norm: AEC-Q101; Part Number: MJD31CAJ; Part Name: MJD31CA; Operating Temperature: -55°C - +150°C; Maximum Drain-Source Voltage: *; Maximum Continous Drain Current (25°C): *; ComponentLink1Description: Datasheet; ComponentLink1URL: https://www.mouser.de/datasheet/2/916/MJD31CA-1665957.pdf; Supplier 1: Mouser; Supplier Part Number 1: 771-MJD31CAJ; R_DS(on): *; Total Gate Charge: *; Supplier 2: Digikey; Supplier Part Number 2: 1727-8685-1-ND; ECCN: EAR99
footprint NEXPERIA_DPAK_SOT428C
pins: 1 B, 2 C, 3 E, 4 C

## MMSZ5237BT1G
designator D?
Zener Diode 8.2 V 500 mW Â±5% Surface Mount SOD-123; MF: ON Semiconductor; MP: MMSZ5237BT1G; SnapEDA_Link: https://www.snapeda.com/parts/MMSZ5237BT1G/Onsemi/view-part/?ref=snap; Package: SOD-123-2 ON Semiconductor; Value: *; Check_prices: https://www.snapeda.com/parts/MMSZ5237BT1G/Onsemi/view-part/?ref=eda
footprint DIO_MMSZ5237BT1G
pins: 1 K, 2 A

## MMSZ5250BT1G
designator D?
Zener Diode 20 V 500 mW Â±5% Surface Mount SOD-123; MF: ON Semiconductor; MP: MMSZ5250BT1G; SnapEDA_Link: https://www.snapeda.com/parts/MMSZ5250BT1G/Onsemi/view-part/?ref=snap; Package: SOD-123-2 ON Semiconductor; Value: *; Check_prices: https://www.snapeda.com/parts/MMSZ5250BT1G/Onsemi/view-part/?ref=eda
footprint DIO_MMSZ5250BT1G
pins: 1 K, 2 A

## MMSZ5255BT1G
designator D?
MMSZ5255BT1G Zener Diode, 28V 5% 500 mW SMT 2-Pin SOD-123 | ON Semiconductor MMSZ5255BT1G; SnapEDA_Link: https://www.snapeda.com/parts/MMSZ5255BT1G/Onsemi/view-part/?ref=snap; Package: SOD-123-2 ON Semiconductor; Value: *; MF: ON Semiconductor; MP: MMSZ5255BT1G; Check_prices: https://www.snapeda.com/parts/MMSZ5255BT1G/Onsemi/view-part/?ref=eda
footprint DIO_MMSZ5255BT1G
pins: 1 K, 2 A

## MMSZ5260BT1G
designator D?
MMSZ5260BT1G Zener Diode, 43V 5% 0.5 W SMT 2-Pin SOD-123 | ON Semiconductor MMSZ5260BT1G; SnapEDA_Link: https://www.snapeda.com/parts/MMSZ5260BT1G/Onsemi/view-part/?ref=snap; Package: SOD-123-2 ON Semiconductor; Value: *; MF: ON Semiconductor; MP: MMSZ5260BT1G; Check_prices: https://www.snapeda.com/parts/MMSZ5260BT1G/Onsemi/view-part/?ref=eda
footprint DIO_MMSZ5260BT1G
pins: 1 K, 2 A

## molex_microfit_3_01x2_THT
designator J?
Micro-Fit 3.0 Right Angle Header, 3.00mm Pitch, Dual Row, 2 Circuits, with Snap-in Plastic Peg PCB Lock, Tin, Glow Wire Capable, Black, 43045-0200; Manufacturer: Molex; Circuits: 2; Rated Voltage: 600V; Rated Current: 8.5A; Automotive Qualified: False; Part Number: molex_microfit_3_01x2_THT; Part Name: MicroFit; Operating Temperature: -40°C - +105°C; Supplier 1: Farnell; Supplier Part Number 1: 1012251; ECCN: EAR99
footprint MOLEX_MICROFIT_01x2_THT
pins: 1, 2

## molex_microfit_3_08x2_THT
designator J?
Micro-Fit 3.0 Right Angle Header, 3.00mm Pitch, Dual Row, 16 Circuits, with Snap-in Plastic Peg PCB Lock, Tin, Glow Wire Capable, Black, 43045-1600; Manufacturer: Molex; Circuits: 16; Rated Voltage: 600V; Rated Current: 8.5A; Automotive Qualified: False; Part Number: molex_microfit_3_08x2_THT; Part Name: MicroFit; Operating Temperature: -40°C - +105°C; Supplier 1: Farnell; Supplier Part Number 1: 9961380; ECCN: EAR99
footprint MOLEX_MICROFIT_08x2_THT
pins: 1, 2, 3, 4, 5, 6, 7, 8, 9, 10, 11, 12, 13, 14, 15, 16

## molex_microfit_3_12x2_THT
designator J?
Micro-Fit 3.0 Right Angle Header, 3.00mm Pitch, Dual Row, 24 Circuits, with Snap-in Plastic Peg PCB Lock, Tin, Glow Wire Capable, Black, 43045-2400; Manufacturer: Molex; Circuits: 24; Rated Voltage: 600V; Rated Current: 8.5A; Automotive Qualified: False; Part Number: molex_microfit_3_12x2_THT; Part Name: MicroFit; Operating Temperature: -40°C - +105°C; Supplier 1: Farnell; Supplier Part Number 1: 1012245; ECCN: EAR99
footprint MOLEX_MICROFIT_12x2_THT
pins: 1, 2, 3, 4, 5, 6, 7, 8, 9, 10, 11, 12, 13, 14, 15, 16, 17, 18, 19, 20, 21, 22, 23, 24

## PACDN042Y3R
designator D?
ESD-Schutzbaustein; Manufacturer: ON Semiconductor; Breakdown Voltage: 8V; PnP Package: SOT23-3; Automotive Qualified: True; Part Number: PACDN042Y3R; Part Name: PACDN042Y3R; ComponentLink1Description: Datasheet; ComponentLink1URL: http://www.farnell.com/datasheets/2354265.pdf; Supplier 1: Farnell; Supplier Part Number 1: 2317483; Supplier 2: Digikey; Supplier Part Number 2: PACDN042Y3ROSCT-ND; Supplier 3: Mouser; Supplier Part Number 3: 748-PACDN042Y3R
footprint ON-SEMI-SOT-23-3-CASE-318-08
pins: 1, 2, 3

## PESD5V0V1BB
designator D?
Very low capacitance bidirectional ESD protection diode; Manufacturer: Nexperia; Breakdown Voltage: 6.8V; PnP Package: SOD523; Automotive Qualified: True; AEC-Q Norm: AEC-Q101; Part Number: PESD5V0V1BB; Part Name: PESD5V0V1BB; Operating Temperature: -55°C - +150°C; Continuous Forward Current: *; ComponentLink1Description: Datasheet; ComponentLink1URL: https://assets.nexperia.com/documents/data-sheet/PESD5V0V1BB.pdf; Supplier 1: Mouser; Supplier Part Number 1: 771-PESD5V0V1BB115; Supplier 2: Digikey; Supplier Part Number 2: 1727-5808-1-ND; Supplier 3: Farnell; Supplier Part Number 3: 2069367; ECCN: EAR99
footprint SOD523_PESD_NEXPERIA
pins: 1 C, 2 A

## PMV48XPAR
designator U?
P-Channel 20 V 3.5A (Ta) 510mW (Ta), 4.15W (Tc) Surface Mount TO-236AB; MF: Nexperia USA; MP: PMV48XPAR; SnapEDA_Link: https://www.snapeda.com/parts/PMV48XPAR/Nexperia/view-part/?ref=snap; Package: SOT23-3 Nexperia USA Inc.; Value: *; Check_prices: https://www.snapeda.com/parts/PMV48XPAR/Nexperia/view-part/?ref=eda
footprint SOT95P230X110-3N
pins: 1 G, 2 S, 3 D

## PTVS60VS1UR
designator D?
400W Transient Voltage Suppressor; Part Name: PTVSxS1UR; Manufacturer: Nexperia; Breakdown Voltage: 70.20V; Automotive Qualified: True; AEC-Q Norm: AEC-Q101; Part Number: PTVS60VS1UR; Operating Temperature: -55°C - +150°C; Continuous Forward Current: *; ComponentLink1Description: Datasheet; ComponentLink1URL: https://assets.nexperia.com/documents/data-sheet/PTVSXS1UR_SER.pdf; Supplier 1: Mouser; Supplier Part Number 1: 771-PTVS60VS1UR115; Supplier 2: Digikey; Supplier Part Number 2: 1727-5879-1-ND; ECCN: EAR99
footprint NEXPERIA_PTVSxS1UR
pins: 1 C, 2 A

## S1MSP1-7
designator D?
1.0A surface mount glass passivated rectifier; Manufacturer: Diodes Inc.; Breakdown Voltage: 1000V; Continuous Forward Current: 1A; Automotive Qualified: False; Part Number: S1MSP1-7; Part Name: S1MSP1-7; Operating Temperature: -55°C - +150°C; ComponentLink1Description: Datasheet; ComponentLink1URL: https://www.mouser.de/datasheet/2/115/S1MSP1-1019698.pdf; Supplier 1: Mouser; Supplier Part Number 1: 621-S1MSP1-7; Supplier 2: Digikey; Supplier Part Number 2: S1MSP1-7-ND; ECCN: EAR99
footprint S1MSP1
pins: 1 K, 2 A

## SHT35-DIS-F
designator U?
Humidity/Temp Sensor, Digital, Dfn-8; Manufacturer: Sensirion; PnP Package: DFN; Automotive Qualified: True; Part Number: SHT35-DIS-F; Part Name: SHT35-DIS-F; Operating Temperature: -40°C - +125°C; ComponentLink1Description: Datasheet; ComponentLink1URL: http://www.farnell.com/datasheets/2756487.pdf; Supplier 1: Farnell; Supplier Part Number 1: 2886656; Supplier 2: Digikey; Supplier Part Number 2: 1649-1067-1-ND; Supplier 3: Mouser; Supplier Part Number 3: 403-SHT35-DIS-F
footprint SHT3X
pins: 1 SDA (io) "Serial data", 2 ADDR (in) "Address pin; connect to either logic high or low, do not leave floating", 3 ALERT (out) "Indicates alarm condition; must be left floating if unused", 4 SCL (io) "Serial clock", 5 VDD (power) "Supply voltage", 6 ~{RESET} (in) "Reset pin active low; if not used it is recommended to be left floating; can be connected to VDD with a series resistor of R >= 2k", 7 R (in) "No electrical function; to be connected to VSS", 8 VSS (power) "Ground", 9 die pad (power) "connect to ground"